# Altium footprint library PTZ.PcbLib: 51 footprints (part 2 of 4)
Each footprint in its own frame and in the unit in brackets; x right, y up, seen from the top. Pads: shape width x height; smd on the part's side, far side on the other; paste and mask are expansions set on the pad; w line width, h text height; cw(c..) or ccw(c..) is an arc to the next point about the centre after c.
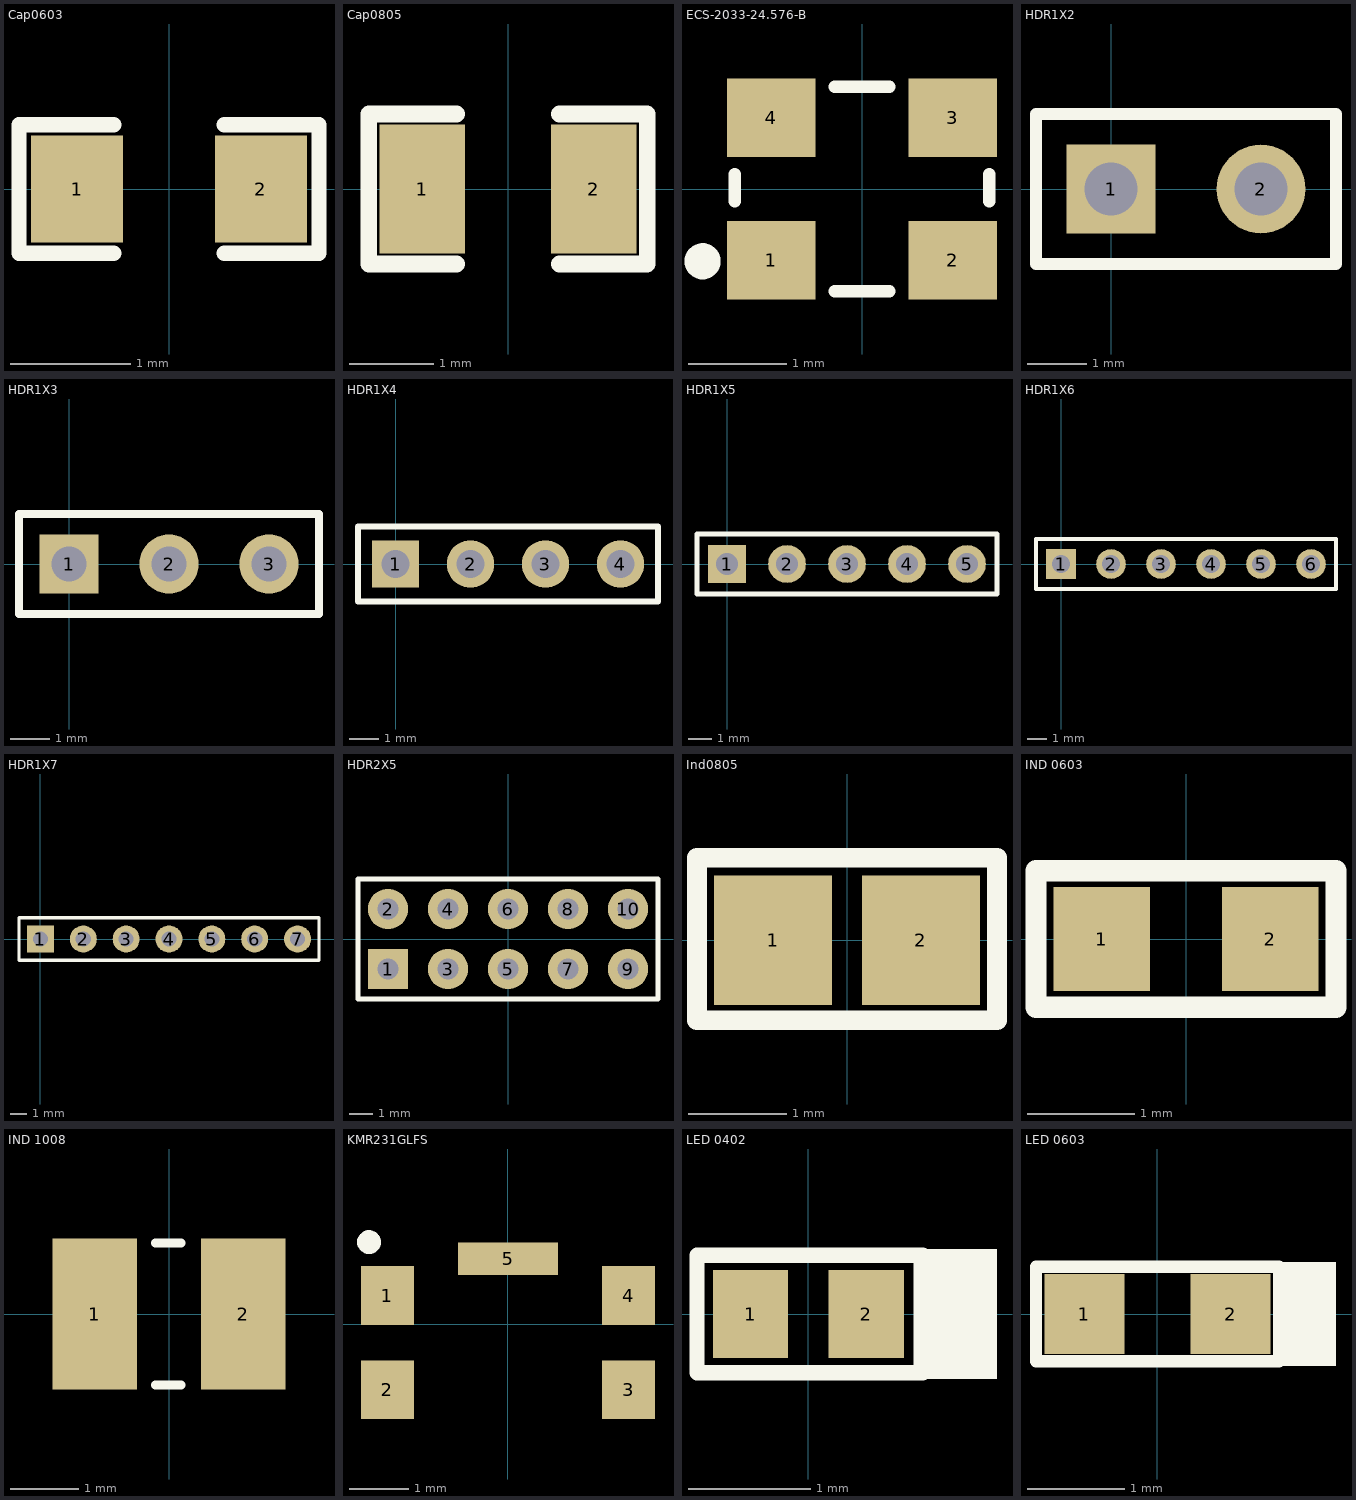
[diagram p1: the footprints below, top view; thin cyan lines are the x and y axes]

## Cap0603 [mil]
pads (2):
  rect 30x35 smd mask+2.36: 1(-30,0) 2(30,0)
Top Overlay:
  lines w5: -18,-21 -49,-21 -49,21 -18,21 ; 18,-21 49,-21 49,21 18,21
3D body "User Library-CAPC1608X09.step": height 34.25, standoff -1.18, extent -31.51,-15.75 31.49,15.74

## Cap0805 [mil] "SMD 0805"
pads (2):
  rect 40x60 smd mask+2.76: 1(-40,0) 2(40,0)
Top Overlay:
  lines w7.87: -24,-35 -65,-35 -65,35 -24,35 ; 24,-35 65,-35 65,35 24,35
3D body "User Library-0805 SMD Capacitor.step": height 30, standoff -0.79, extent -39.36,-24.6 39.38,24.61

## ECS-2033-24.576-B [mm]
pads (4):
  rect 0.9x0.8 smd mask+0.07: 1(-0.925,-0.725) 2(0.925,-0.725) 3(0.925,0.725) 4(-0.925,0.725)
Top Overlay:
  circle w0.254: c-1.626,-0.737 r0.057
  lines w0.127: -1.295,-0.127 -1.295,0.152 ; -0.279,-1.041 0.279,-1.041 ; -0.279,1.041 0.279,1.041 ; 1.295,-0.127 1.295,0.152
3D body "ECS-2033-245.7-B-TR.STEP": height 1, standoff 0, extent -1.25,-1 1.25,1

## HDR1X2 [mm] "CONN HEADER VERT 2POS 2.54MM"
pads (2):
  rect 1.5x1.5 hole 0.9: 1(0,0)
  round 1.5 hole 0.9: 2(2.54,0)
Top Overlay:
  lines w0.2: -1.27,-1.27 -1.27,1.27 3.81,1.27 3.81,-1.27 -1.27,-1.27
3D body "User Library-Header1x2.STEP": height 8.44, standoff -2.54, extent -1.27,-1.27 3.81,1.27

## HDR1X3 [mm] "Connector; Header; 3 Position"
pads (3):
  rect 1.5x1.5 hole 0.9: 1(0,0)
  round 1.5 hole 0.9: 2(2.54,0) 3(5.08,0)
Top Overlay:
  lines w0.2: -1.27,-1.27 -1.27,1.27 6.35,1.27 6.35,-1.27 -1.27,-1.27
3D body "User Library-Header_Male_3Pin.STEP": height 8.54, standoff -3, extent -1.27,-1.245 6.35,1.245

## HDR1X4 [mm] "Connector; Header; 4 Position"
pads (4):
  rect 1.6x1.6 hole 0.95: 1(0,0)
  round 1.6 hole 0.95: 2(2.54,0) 3(5.08,0) 4(7.62,0)
Top Overlay:
  lines w0.2: -1.27,-1.27 -1.27,1.27 8.89,1.27 8.89,-1.27 -1.27,-1.27
3D body "User Library-1x4 TH Pitch 2_54mm.STEP": height 9.5, standoff -3.2, extent -1.27,-1.27 8.89,1.27

## HDR1X5 [mm] "Connector; Header; 5 Position"
pads (5):
  rect 1.6x1.6 hole 0.95: 1(0,0)
  round 1.6 hole 0.95: 2(2.54,0) 3(5.08,0) 4(7.62,0) 5(10.16,0)
Top Overlay:
  lines w0.2: -1.27,-1.27 11.43,-1.27 11.43,1.27 -1.27,1.27 -1.27,-1.27
3D body "CircuitWorks-HEADER 2_54 VERTICAL 5X.step": height 8.65, standoff -2.35, extent -1.27,-1.27 11.43,1.23

## HDR1X6 [mm] "Connector; Header; 6 Position"
pads (6):
  rect 1.5x1.5 hole 0.9: 1(0,0)
  round 1.5 hole 0.9: 2(2.54,0) 3(5.08,0) 4(7.62,0) 5(10.16,0) 6(12.7,0)
Top Overlay:
  lines w0.2: -1.27,-1.27 -1.27,1.27 13.97,1.27 13.97,-1.27 -1.27,-1.27
3D body "User Library-Header_Male_6Pin.STEP": height 8.54, standoff -3, extent -1.27,-1.245 13.97,1.245

## HDR1X7 [mm] "Connector; Header; 7 Position"
pads (7):
  rect 1.6x1.6 hole 0.9: 1(0,0)
  round 1.6 hole 0.9: 2(2.54,0) 3(5.08,0) 4(7.62,0) 5(10.16,0) 6(12.7,0) 7(15.24,0)
Top Overlay:
  lines w0.2: -1.27,-1.27 16.51,-1.27 16.51,1.27 -1.27,1.27 -1.27,-1.27
3D body "User Library-Header_Male_7Pin.STEP": height 8.74, standoff -2.8, extent -1.27,-1.245 16.51,1.245

## HDR2X5 [mm] "Connector; Header; 5x2 Position"
pads (10):
  rect 1.7x1.7 hole 0.9: 1(-5.08,-1.27)
  round 1.7 hole 0.9: 2(-5.08,1.27) 3(-2.54,-1.27) 4(-2.54,1.27) 5(0,-1.27) 6(0,1.27) 7(2.54,-1.27) 8(2.54,1.27) 9(5.08,-1.27) 10(5.08,1.27)
Top Overlay:
  lines w0.2: -6.35,-2.54 6.35,-2.54 6.35,2.54 -6.35,2.54 -6.35,-2.54
3D body "67997-410HLF--3DModel-STEP-554624.STEP": height 8.38, standoff -3.05, extent -6.35,-2.415 6.35,2.415

## Ind0805 [mm] "Inductor 0805"
pads (2):
  rect 1.2x1.32 smd: 1(-0.75,0) 2(0.75,0)
Top Overlay:
  lines w0.2: -1.524,-0.813 -1.524,0.838 1.524,0.838 1.524,-0.813 -1.524,-0.813
3D body "45637.stp": height 0.47, standoff -0.03, extent -1,-0.625 1,0.625

## IND 0603 [mm]
pads (2):
  rect 0.9x0.97 smd: 1(-0.785,0) 2(0.785,0)
Top Overlay:
  lines w0.2: -1.397,-0.635 -1.397,0.635 1.397,0.635 1.397,-0.635 -1.397,-0.635
3D body "45630.stp": height 0.78, standoff -0.02, extent -0.8,-0.4 0.8,0.4

## IND 1008 [mm]
pads (2):
  rect 1.24x2.22 smd: 1(-1.09,0) 2(1.09,0)
Top Overlay:
  lines w0.127: -0.203,-1.041 0.178,-1.041 ; -0.203,1.041 0.178,1.041
3D body "LQM2HPN2R2MG0L.STEP": height 1, standoff 0, extent -1.25,-1 1.25,1

## KMR231GLFS [mm]
pads (5):
  rect 0.9x1 smd: 1(-2.05,0.488) 2(-2.05,-1.112) 3(2.05,-1.112) 4(2.05,0.488)
  rect 1.7x0.55 smd: 5(0,1.113)
Top Overlay:
  circle w0.254: c-2.362,1.397 r0.076

## LED 0402 [mm]
pads (2):
  rect 0.62x0.72 smd: 1(-0.475,0) 2(0.475,0)
Top Overlay:
  rectangle: 0.864,-0.533 1.549,0.533
  lines w0.127: 0.94,-0.483 -0.914,-0.483 -0.914,0.483 0.94,0.483
3D body "User Library-LED-0402.step": height 0.45, standoff 0, extent -0.505,-0.25 0.505,0.25

## LED 0603 [mm] "LED 0603"
pads (2):
  rect 0.82x0.82 smd: 1(-0.75,0) 2(0.75,0)
Top Overlay:
  region: 1.829,0.533 1.27,0.533 1.27,-0.533 1.829,-0.533
  lines w0.127: -1.245,-0.483 1.245,-0.483 1.245,0.483 -1.245,0.483 -1.245,-0.483
3D body "User Library-SMD LED 0603.step": height 0.38, standoff -0.01, extent -0.775,-0.4 0.825,0.4